# Altium footprint library TI_DFM0020A.PcbLib: 1 footprints
Each footprint in its own frame and in the unit in brackets; x right, y up, seen from the top. Pads: shape width x height; smd on the part's side, far side on the other; paste and mask are expansions set on the pad; w line width, h text height; cw(c..) or ccw(c..) is an arc to the next point about the centre after c.
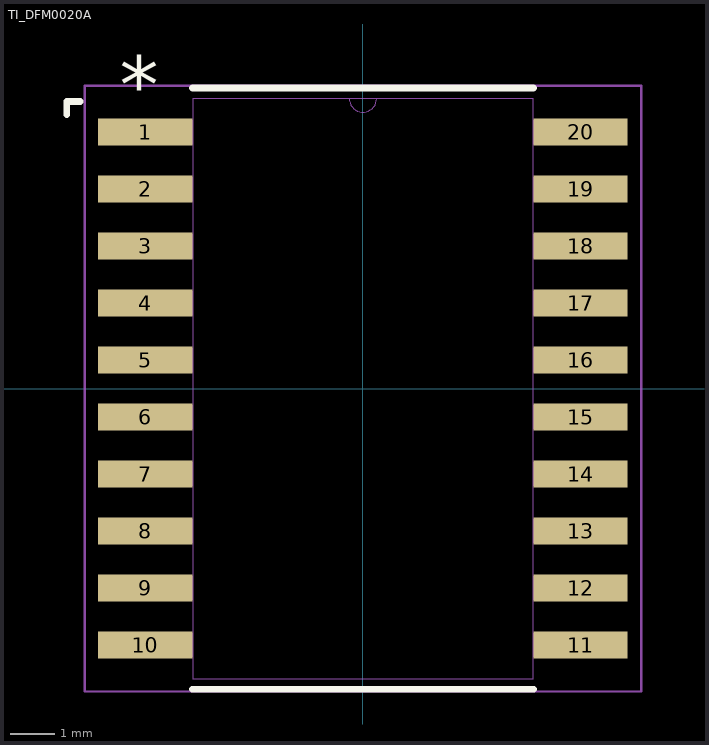
[diagram p0: the footprint, top view; thin cyan lines are the x and y axes]

## TI_DFM0020A [mm] "TI DFM0020A SOIC20 for ISOW1432DFMR; TI land pattern 2.1x0.6mm, pitch1.27mm, rows9.7mm"
height 3.55
pads (20):
  rect 2.1x0.6 smd paste+0 mask+0.05: 1(-4.85,5.715) 2(-4.85,4.445) 3(-4.85,3.175) 4(-4.85,1.905) 5(-4.85,0.635) 6(-4.85,-0.635) 7(-4.85,-1.905) 8(-4.85,-3.175) 9(-4.85,-4.445) 10(-4.85,-5.715) 11(4.85,-5.715) 12(4.85,-4.445) 13(4.85,-3.175) 14(4.85,-1.905) 15(4.85,-0.635) 16(4.85,0.635) 17(4.85,1.905) 18(4.85,3.175) 19(4.85,4.445) 20(4.85,5.715)
Top Overlay:
  lines w0.15: -6.6,6.1 -6.6,6.4 -6.3,6.4 ; -3.8,-6.7 3.8,-6.7 ; -3.8,6.7 3.8,6.7
  text "*" at -5.423,6.146 h1.27
  text ".Designator" at -3.492,-0.635 h1.2
Mechanical 13:
  lines w0.025: -0.305,6.464 ccw(c0,6.464) 0.305,6.464 ; -5.321,-5.969 -5.321,-5.461 -3.797,-5.461 -3.797,-5.969 -5.321,-5.969 ; -5.321,-4.699 -5.321,-4.191 -3.797,-4.191 -3.797,-4.699 -5.321,-4.699 ; -5.321,-3.429 -5.321,-2.921 -3.797,-2.921 -3.797,-3.429 -5.321,-3.429 ; -5.321,-2.159 -5.321,-1.651 -3.797,-1.651 -3.797,-2.159 -5.321,-2.159 ; -5.321,-0.889 -5.321,-0.381 -3.797,-0.381 -3.797,-0.889 -5.321,-0.889 ; -5.321,0.381 -5.321,0.889 -3.797,0.889 -3.797,0.381 -5.321,0.381 ; -5.321,1.651 -5.321,2.159 -3.797,2.159 -3.797,1.651 -5.321,1.651 ; -5.321,2.921 -5.321,3.429 -3.797,3.429 -3.797,2.921 -5.321,2.921 ; -5.321,4.191 -5.321,4.699 -3.797,4.699 -3.797,4.191 -5.321,4.191 ; -5.321,5.461 -5.321,5.969 -3.797,5.969 -3.797,5.461 -5.321,5.461 ; -3.797,-6.464 3.797,-6.464 3.797,6.464 -3.797,6.464 -3.797,-6.464 ; 3.797,-5.969 3.797,-5.461 5.321,-5.461 5.321,-5.969 3.797,-5.969 ; 3.797,-4.699 3.797,-4.191 5.321,-4.191 5.321,-4.699 3.797,-4.699 ; 3.797,-3.429 3.797,-2.921 5.321,-2.921 5.321,-3.429 3.797,-3.429 ; 3.797,-2.159 3.797,-1.651 5.321,-1.651 5.321,-2.159 3.797,-2.159 ; 3.797,-0.889 3.797,-0.381 5.321,-0.381 5.321,-0.889 3.797,-0.889 ; 3.797,0.381 3.797,0.889 5.321,0.889 5.321,0.381 3.797,0.381 ; 3.797,1.651 3.797,2.159 5.321,2.159 5.321,1.651 3.797,1.651 ; 3.797,2.921 3.797,3.429 5.321,3.429 5.321,2.921 3.797,2.921 ; 3.797,4.191 3.797,4.699 5.321,4.699 5.321,4.191 3.797,4.191 ; 3.797,5.461 3.797,5.969 5.321,5.969 5.321,5.461 3.797,5.461
  text ".Designator" at -3.492,-0.635 h1.27
  text "*" at -3.734,5.118 h1.27
Mechanical 15:
  lines w0.05: -6.2,-6.75 6.2,-6.75 6.2,6.75 -6.2,6.75 -6.2,-6.75
3D body "SOIC_2DFM_TEX.step": height 3.56, standoff 0, extent -5.321,-6.464 5.321,6.464